# Altium footprint library Battery.PcbLib: 20 footprints (part 2 of 2)
Each footprint in its own frame and in the unit in brackets; x right, y up, seen from the top. Pads: shape width x height; smd on the part's side, far side on the other; paste and mask are expansions set on the pad; w line width, h text height; cw(c..) or ccw(c..) is an arc to the next point about the centre after c.
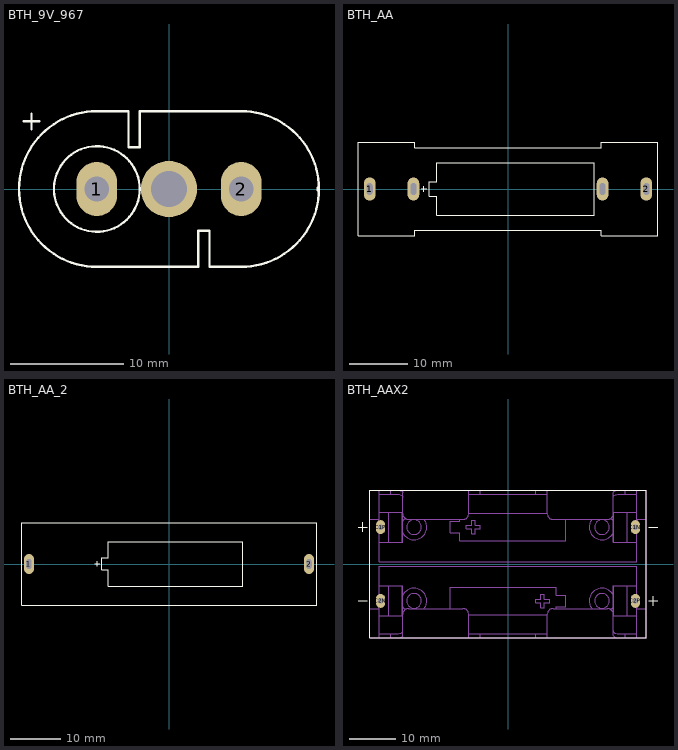
[diagram p1: the footprints below, top view; thin cyan lines are the x and y axes]

## BTH_9V_967 [mm] "BATTERY HOLDER, keystone 967"
pads (3):
  oval 3.6x4.8 hole 2.2: 1(-6.4,0) 2(6.4,0)
  round 5 hole 3.2 unplated: ""(0,0)
Top Overlay:
  circle w0.2: c-6.4,0 r3.8
  lines w0.2: -12.9,6 -11.5,6 ; -12.2,5.3 -12.2,6.7 ; -2.5,6.9 -2.6,6.9 ; 2.5,-6.9 2.6,-6.9 ; 13.2,-0.1 13.2,0.1 ; -2.6,6.9 -2.6,3.7 -3.6,3.7 -3.6,6.9 -6.4,6.9 ccw(c-6.4,0) -6.4,-6.9 2.6,-6.9 ; -2.6,6.9 6.4,6.9 cw(c6.4,0) 6.4,-6.9 3.6,-6.9 3.6,-3.7 2.6,-3.7 2.6,-6.9
Top Designator:
  text ".Designator" at -3.71,-0.344 h1.52
3D body "keystone-PN967.STEP": height 6.19, standoff -2.24, extent -13.189,-6.795 13.1,6.794

## BTH_AA [mm] "Keystone 82"
height 1.8
pads (4):
  oval 2x4 hole 1 slot 2 at 90 deg: 1(-23.7,0) 2(23.7,0) ""(-16.2,0) ""(16.2,0)
Top Overlay:
  lines w0.2: -14.9,0 -13.9,0 ; -14.4,-0.5 -14.4,0.5 ; -25.7,-8 -25.7,8 -16,8 -16,7.1 16,7.1 16,8 25.7,8 25.7,-8 16,-8 16,-7.1 -16,-7.1 -16,-8 -25.7,-8 ; -13.5,-1.2 -12.2,-1.2 -12.2,-4.5 14.8,-4.5 14.8,4.5 -12.2,4.5 -12.2,1.2 -13.5,1.2 -13.5,-1.2
Top Designator:
  text ".Designator" at -3.71,-0.344 h1.52
3D body "User Library-aa smt battery clip-1.SLDPRT": height 16.69, standoff -4.01, extent 16.075,-7.896 25.589,7.896
3D body "User Library-aa smt battery clip-1.SLDPRT": height 16.69, standoff -4.01, extent -25.589,-7.896 -16.075,7.896
3D body "User Library-BATTERY_AA.SLDPRT": height 16.01, standoff 1.99, extent -24.9,-7.004 24.9,7.01

## BTH_AA_2 [mm]
height 1.8
pads (2):
  oval 2x4 hole 1 slot 2 at 90 deg: 1(-28,0) 2(28,0)
Top Overlay:
  lines w0.2: -14.9,0 -13.9,0 ; -14.4,-0.5 -14.4,0.5 ; -29.5,-8.3 29.6,-8.3 29.6,8.3 -29.5,8.3 -29.5,-8.3 ; -13.5,-1.2 -13.5,1.2 -12.2,1.2 -12.2,4.5 14.8,4.5 14.8,-4.5 -12.2,-4.5 -12.2,-1.2 -13.5,-1.2
Top Designator:
  text ".Designator" at -3.66,-0.344 h1.52
3D body "User Library-BATTERY_AA.SLDPRT": height 16.01, standoff 1.99, extent -24.9,-7.004 24.9,7.01
3D body "User Library-BAT_HLDR_BHAA-POL_1_2.sldprt": height 18.63, standoff -4.48, extent 24.801,-4.5 28.485,4.39
3D body "User Library-BAT_HLDR_BHAA-POL_1_2.sldprt": height 18.63, standoff -4.48, extent -28.485,-4.39 -24.801,4.5
3D body "User Library-BAT_HLDR_BHAA-POL_1_3.sldprt": height 19.92, standoff 0.1, extent -29.428,-8.255 29.5,8.255

## BTH_AAX2 [mm] "2-cell AA battery holder"
height 16.764
pads (4):
  oval 2x3 hole 1.2: C1N(27.6,8) C1P(-27.6,8) C2N(-27.6,-8) C2P(27.6,-8)
Top Overlay:
  lines w0.2: -32.5,-8 -30.5,-8 ; -32.5,8 -30.5,8 ; -31.5,7 -31.5,9 ; 30.5,-8 32.5,-8 ; 30.5,8 32.5,8 ; 31.5,-9 31.5,-7 ; -30,-16 -30,16 30,16 30,-16 -30,-16
Top Designator:
  text ".Designator" at -3.71,-0.344 h1.52
Mechanical 13:
  drawing of 198 lines, arcs and shapes, not listed
3D body "2xAA Battery Holder.STEP": height 16.7, standoff -3, extent -30,-16 30,16